# Altium footprint library Capacitores.PcbLib: 30 footprints (part 1 of 2)
Each footprint in its own frame and in the unit in brackets; x right, y up, seen from the top. Pads: shape width x height; smd on the part's side, far side on the other; paste and mask are expansions set on the pad; w line width, h text height; cw(c..) or ccw(c..) is an arc to the next point about the centre after c.
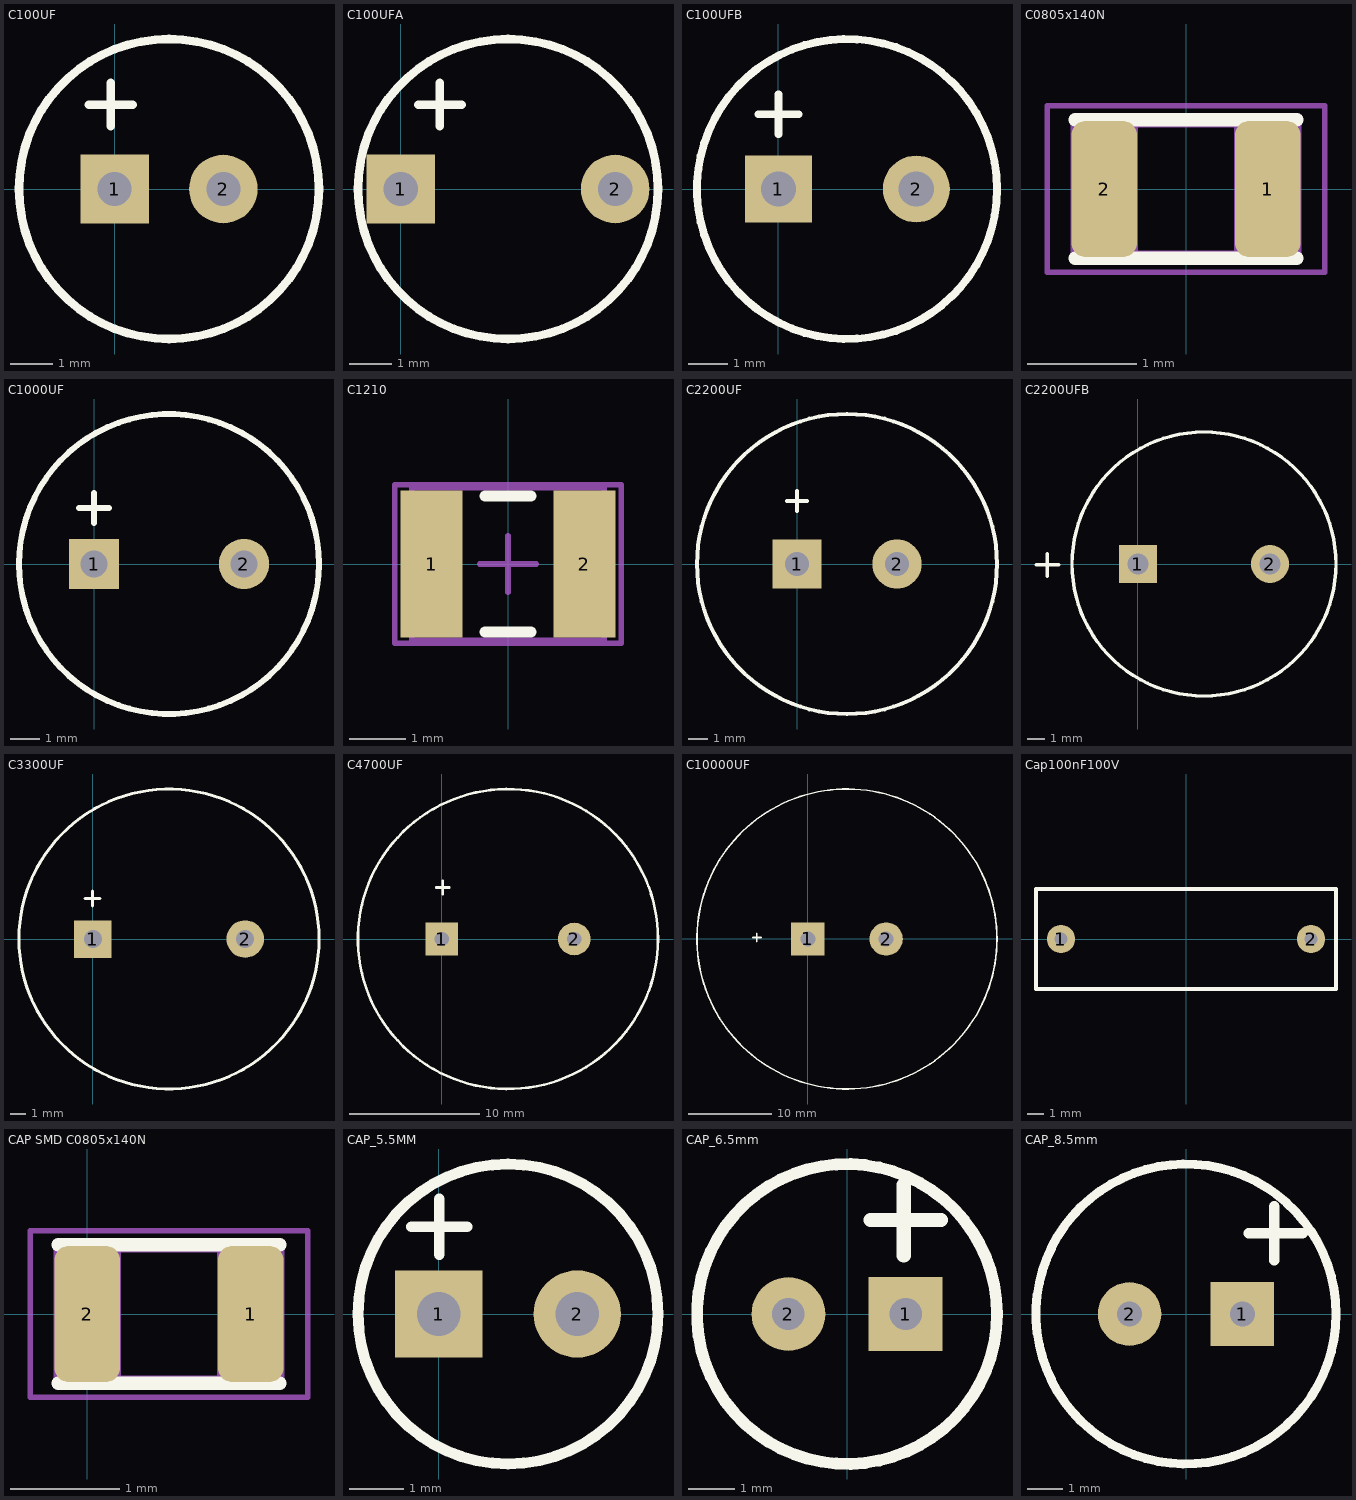
[diagram p0: the footprints below, top view; thin cyan lines are the x and y axes]

## C100UF [mm]
pads (2):
  rect 1.6x1.6 hole 0.8: 1(0,0)
  round 1.6 hole 0.8: 2(2.54,0)
Top Overlay:
  circle w0.2: c1.27,0 r3.5
  lines w0.2: -0.598,1.97 0.418,1.97 ; -0.09,1.462 -0.09,2.478

## C100UFA [mm]
pads (2):
  rect 1.6x1.6 hole 0.8: 1(0,0)
  round 1.6 hole 0.8: 2(5,0)
Top Overlay:
  circle w0.2: c2.5,0 r3.5
  lines w0.2: 0.402,1.97 1.418,1.97 ; 0.91,1.462 0.91,2.478

## C100UFB [mm]
pads (2):
  rect 1.7x1.7 hole 0.9: 1(0,0)
  round 1.7 hole 0.9: 2(3.5,0)
Top Overlay:
  circle w0.2: c1.74,0 r3.81
  lines w0.2: -0.508,1.9 0.508,1.9 ; 0,1.392 0,2.408

## C0805x140N [mm] "Capacitor, Chip;2.0mm L X 1.25mm W X 0.78mm H body"
height 0.78
pads (2):
  rrect43% 0.6x1.25 smd: 1(0.75,0) 2(-0.75,0)
Top Overlay:
  lines w0.12: -1.016,-0.635 1.016,-0.635 ; -1.016,0.635 1.016,0.635
Mechanical 13:
  lines w0.12: -0.5,-0.625 -0.5,0.625 ; 0.5,-0.625 0.5,0.625 ; -1,-0.625 1,-0.625 1,0.625 -1,0.625 -1,-0.625
Mechanical 15:
  lines w0.05: -1.27,-0.762 1.27,-0.762 1.27,0.762 -1.27,0.762 -1.27,-0.762
3D body: height 0.79, standoff 0, extent 0.501,-0.624 0.999,0.624
3D body: height 0.79, standoff 0, extent -0.999,-0.624 -0.501,0.624
3D body: height 0.78, standoff 0, extent -0.499,-0.624 0.499,0.624

## C1000UF [mm]
pads (2):
  rect 1.7x1.7 hole 0.9: 1(0,0)
  round 1.7 hole 0.9: 2(5.08,0)
Top Overlay:
  circle w0.2: c2.54,0 r5.08
  lines w0.2: -0.508,1.9 0.508,1.9 ; 0,1.392 0,2.408

## C1210 [mm] "Chip Capacitor, Body 3.2x2.5mm, IPC High Density"
height 1.3
pads (2):
  rect 1.1x2.6 smd: 1(-1.35,0) 2(1.35,0)
Top Overlay:
  lines w0.2: -0.4,-1.2 0.4,-1.2 ; -0.4,1.2 0.4,1.2
Mechanical 13:
  lines w0.1: -1.7,-1.35 1.7,-1.35 1.7,1.35 -1.7,1.35 -1.7,-1.35
Mechanical 15:
  lines w0.1: -0.5,0 0.5,0 ; 0,-0.5 0,0.5 ; -2,-1.4 2,-1.4 2,1.4 -2,1.4 -2,-1.4
3D body: height 1.3, standoff 0, extent -1.7,-1.35 1.7,1.35

## C2200UF [mm]
pads (2):
  rect 2.5x2.5 hole 1.2: 1(0,0)
  round 2.5 hole 1.2: 2(5.08,0)
Top Overlay:
  circle w0.2: c2.54,0 r7.62
  lines w0.2: -0.508,3.2 0.508,3.2 ; 0,2.692 0,3.708

## C2200UFB [mm]
pads (2):
  rect 2.2x2.2 hole 1.2: 1(0,0)
  round 2.2 hole 1.2: 2(7.62,0)
Top Overlay:
  circle w0.2: c3.81,0 r7.62
  lines w0.2: -5.888,-0.05 -4.57,-0.05 ; -5.23,-0.718 -5.23,0.6

## C3300UF [mm]
pads (2):
  rect 2.5x2.5 hole 1.2: 1(0,0)
  round 2.5 hole 1.2: 2(10.16,0)
Top Overlay:
  circle w0.2: c5.08,0 r10
  lines w0.2: -0.528,2.7 0.488,2.7 ; -0.02,2.192 -0.02,3.208

## C4700UF [mm]
pads (2):
  rect 2.5x2.5 hole 1.1: 1(0,0)
  round 2.5 hole 1.1: 2(10.16,0)
Top Overlay:
  circle w0.2: c5.08,0 r11.5
  lines w0.2: -0.428,3.95 0.588,3.95 ; 0.08,3.442 0.08,4.458

## C10000UF [mm]
pads (2):
  rect 4x4 hole 1.8: 1(0,0)
  round 4 hole 1.8: 2(9.4,0)
Top Overlay:
  circle w0.2: c4.7,0 r18
  lines w0.2: -6.628,0.19 -5.612,0.19 ; -6.12,-0.318 -6.12,0.698

## Cap100nF100V [mm]
pads (2):
  round 1.7 hole 0.8: 1(-7.5,0) 2(7.5,0)
Top Overlay:
  lines w0.254: -9,-3 9,-3 9,3 -9,3 -9,-3

## CAP SMD C0805x140N [mm] "Capacitor, Chip;2.0mm L X 1.25mm W X 0.78mm H body"
height 0.78
pads (2):
  rrect43% 0.6x1.25 smd: 1(1.5,0) 2(0,0)
Top Overlay:
  lines w0.12: -0.266,-0.635 1.766,-0.635 ; -0.266,0.635 1.766,0.635
Mechanical 13:
  lines w0.12: 0.25,-0.625 0.25,0.625 ; 1.25,-0.625 1.25,0.625 ; -0.25,-0.625 1.75,-0.625 1.75,0.625 -0.25,0.625 -0.25,-0.625
Mechanical 15:
  lines w0.05: -0.52,-0.762 2.02,-0.762 2.02,0.762 -0.52,0.762 -0.52,-0.762
3D body: height 0.79, standoff 0, extent 1.251,-0.624 1.749,0.624
3D body: height 0.79, standoff 0, extent -0.249,-0.624 0.249,0.624
3D body: height 0.78, standoff 0, extent 0.251,-0.624 1.249,0.624

## CAP_5.5MM [mm] "1-10-47uF"
pads (2):
  rect 1.6x1.6 hole 0.8: 1(0,0)
  round 1.6 hole 0.8: 2(2.54,0)
Top Overlay:
  circle w0.2: c1.27,0 r2.75
  lines w0.2: -0.498,1.6 0.518,1.6 ; 0.01,1.092 0.01,2.108
3D body "cappr-2_5.5h12.step": height 12, standoff -3, extent -1.48,-2.75 4.02,2.75

## CAP_6.5mm [mm] "100-220uF 25V"
pads (2):
  rect 1.6x1.6 hole 0.7: 1(1.27,0)
  round 1.6 hole 0.7: 2(-1.27,0)
Top Overlay:
  circle w0.254: c0,0 r3.25
  lines w0.305: 0.508,2.032 2.032,2.032 ; 1.23,1.27 1.23,2.794
Mechanical 1:
  circle w0.02: c0,0 r3.25
3D body "cappr-2.5_6.5h12.step": height 12, standoff -3, extent -3.25,-3.25 3.25,3.249

## CAP_8.5mm [mm] "330-470uF 25V"
pads (2):
  rect 1.8x1.8 hole 0.7: 1(1.6,0)
  round 1.8 hole 0.7: 2(-1.6,0)
Top Overlay:
  circle w0.254: c0,0 r4.25
  lines w0.305: 1.778,2.286 3.302,2.286 ; 2.5,1.524 2.5,3.048
Mechanical 1:
  circle w0.02: c0,0 r4.25
3D body "cappr-3.5_8.5h12.5.step": height 12.5, standoff -3, extent -4.25,-4.25 4.25,4.25